# Altium footprint library SYNCBOX_V3I1.PcbLib: 268 footprints (part 8 of 17)
Each footprint in its own frame and in the unit in brackets; x right, y up, seen from the top. Pads: shape width x height; smd on the part's side, far side on the other; paste and mask are expansions set on the pad; w line width, h text height; cw(c..) or ccw(c..) is an arc to the next point about the centre after c.
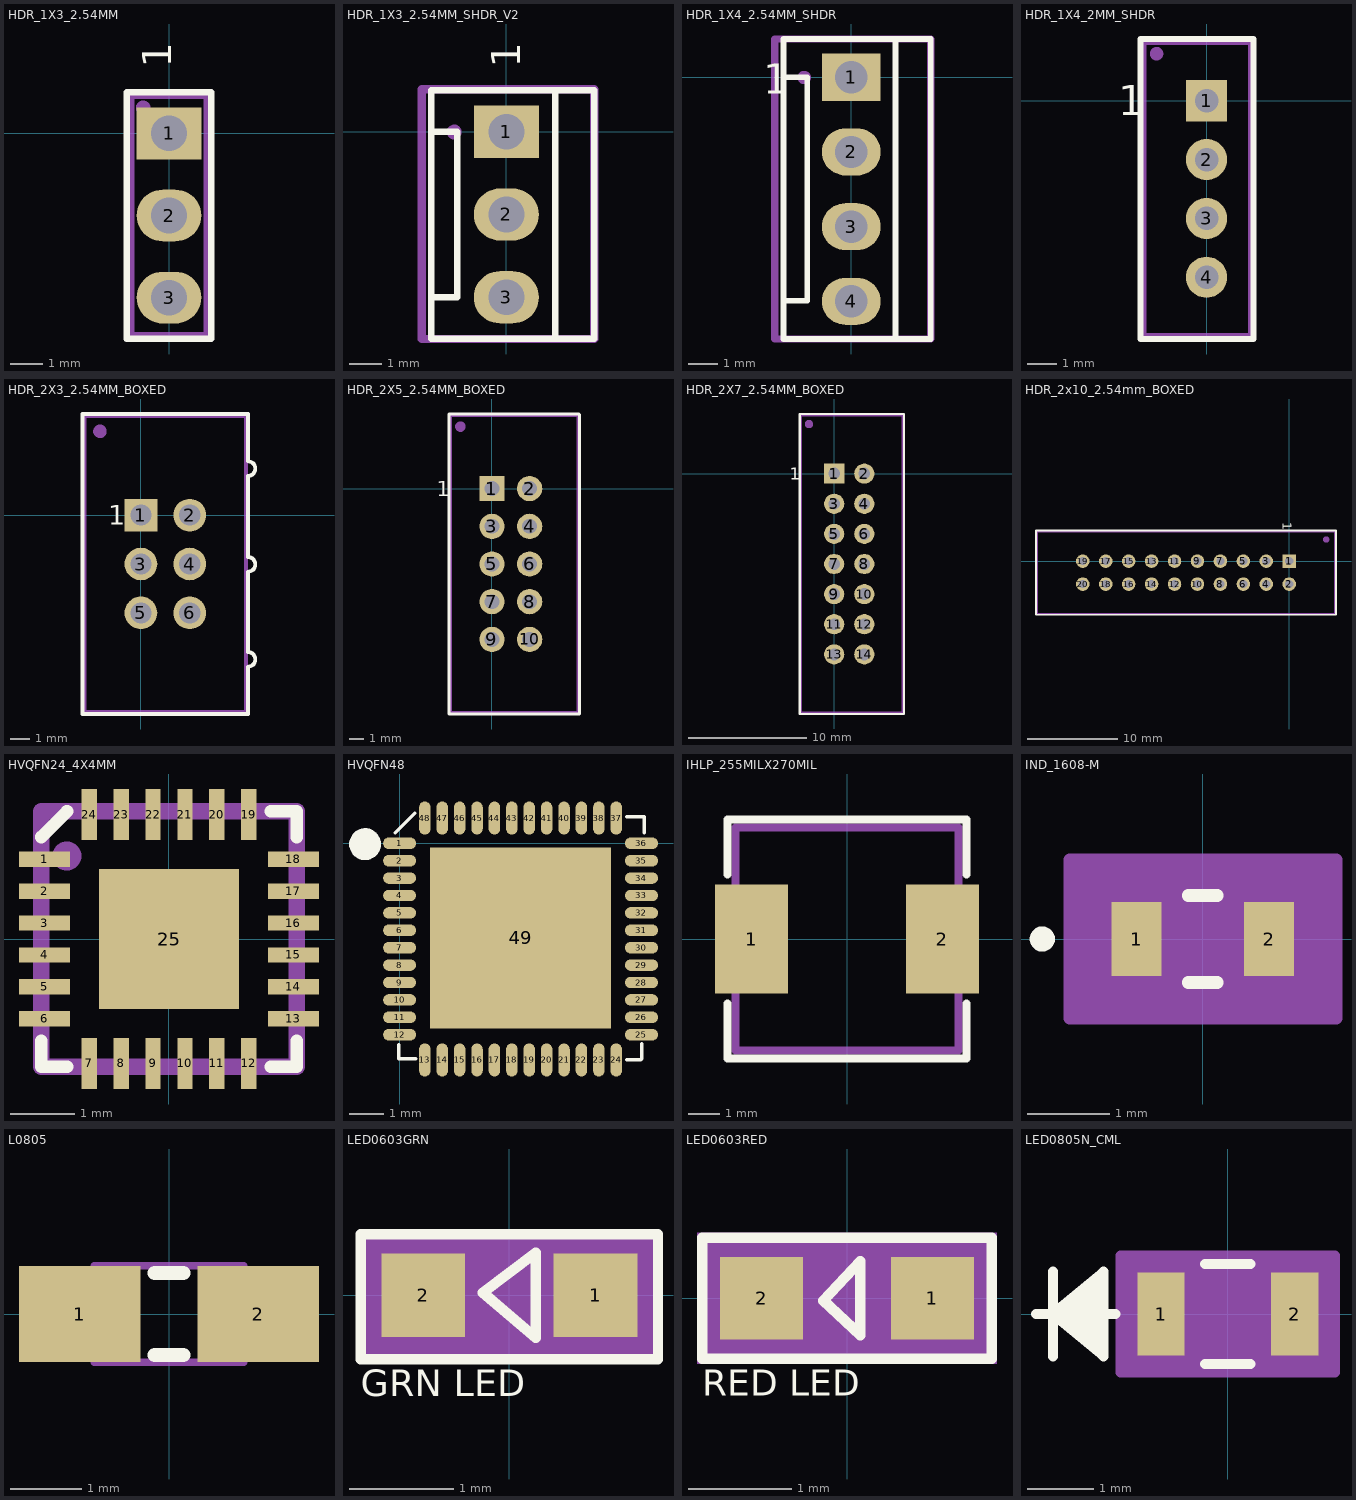
[diagram p7: the footprints below, top view; thin cyan lines are the x and y axes]

## HDR_1X3_2.54MM [mm]
pads (3):
  rect 2x1.6 hole 1.1: 1(0,0)
  oval 2x1.6 hole 1.1: 2(0,-2.54) 3(0,-5.08)
Top Overlay:
  lines w0.2: -1.3,-6.36 -1.3,1.27 1.3,1.27 1.3,-6.3 ; -1.3,-6.35 1.3,-6.35
  text "1" at 0.076,2.032 h0.89
Mechanical 16:
  circle w0.254: c-0.8,0.79 r0.1
  lines w0.254: -1.2,-6.27 1.2,-6.27 1.2,1.19 -1.2,1.19 -1.2,-6.27
Mechanical 29:
  text ".Designator" at 0.8,-4.5 h1.52
3D body "77311-y18-03_asm.stp": height 8.4, standoff -3.1, extent -1.2,-6.15 1.21,1.07

## HDR_1X3_2.54MM_SHDR_V2 [mm]
pads (3):
  rect 2x1.6 hole 1.1: 1(0,0)
  oval 2x1.6 hole 1.1: 2(0,-2.54) 3(0,-5.08)
Top Overlay:
  lines w0.2: -2.3,-5.08 -1.5,-5.08 -1.5,0 -2.3,0 ; 1.5,-6.35 1.5,1.27 ; -2.3,-6.35 -2.3,1.27 2.7,1.27 2.7,-6.35 -2.3,-6.35
  text "1" at 0.432,1.956 h0.89
Mechanical 16:
  circle w0.254: c-1.6,-0.01 r0.1
  lines w0.254: -2.6,-6.36 2.7,-6.36 2.7,1.3 -2.6,1.3 -2.6,-6.36
Mechanical 29:
  text ".Designator" at -0.6,-0.9 h1.52
3D body "76384-303LFc.STEP": height 8.84, standoff -3.93, extent -2.642,-5.799 2.607,0.821

## HDR_1X4_2.54MM_SHDR [mm]
pads (4):
  rect 2x1.6 hole 1.1: 1(0,0)
  oval 2x1.6 hole 1.1: 2(0,-2.54) 3(0,-5.08) 4(0,-7.62)
Top Overlay:
  lines w0.2: -2.3,-7.6 -1.5,-7.6 -1.5,0 -2.3,0 ; 1.5,-8.9 1.5,1.3 ; -2.3,-8.9 -2.3,1.3 2.7,1.3 2.7,-8.9 -2.3,-8.9
  text "1" at -2.994,-0.57 h1.02
Mechanical 16:
  circle w0.254: c-1.6,-0.01 r0.1
  lines w0.254: -2.6,-8.9 2.7,-8.9 2.7,1.3 -2.6,1.3 -2.6,-8.9
Mechanical 29:
  text ".Designator" at -1,-1.84 h1.52
3D body "76384-304lf.stp": height 9.34, standoff -3.43, extent -2.6,-8.39 2.649,0.77

## HDR_1X4_2MM_SHDR [mm]
pads (4):
  rect 1.4x1.4 hole 0.8: 1(0,0)
  round 1.4 hole 0.8: 2(0,-2) 3(0,-4) 4(0,-6)
Top Overlay:
  lines w0.2: -2.25,-8.1 -2.25,2.1 1.6,2.1 1.6,-8.1 -2.25,-8.1
  text "1" at -3,-0.5 h1.02
Mechanical 16:
  circle w0.254: c-1.7,1.6 r0.1
  lines w0.2: -2.15,-8 1.5,-8 1.5,2 -2.15,2 -2.15,-8
Mechanical 29:
  text ".Designator" at 0.5,-5.2 h1.52
3D body "532530470.stp": height 5.55, standoff -3.45, extent -2.15,-8 1.5,2

## HDR_2X3_2.54MM_BOXED [mm]
pads (6):
  rect 1.7x1.7 hole 1.1: 1(0,0)
  round 1.7 hole 1.1: 2(2.54,0) 3(0,-2.54) 4(2.54,-2.54) 5(0,-5.08) 6(2.54,-5.08)
Top Overlay:
  lines w0.2: 5.57,-10.34 -3.03,-10.34 -3.03,5.26 5.57,5.26 5.57,2.8 cw(c5.57,2.42) 5.57,2.04 5.57,-2.18 cw(c5.57,-2.56) 5.57,-2.94 5.57,-7.12 cw(c5.57,-7.5) 5.57,-7.88 5.57,-10.3
  text "1" at -1.7,-0.5 h1.02
Mechanical 16:
  circle w0.5: c-2.13,4.36 r0.1
  lines w0.2: -2.93,-10.24 -2.93,5.16 5.47,5.16 5.47,-10.24 -2.93,-10.24
Mechanical 29:
  text ".Designator" at 2,-4.5 h1.52
3D body "30306-6002.stp": height 8.89, standoff -3.17, extent -2.931,-10.155 5.883,5.06

## HDR_2X5_2.54MM_BOXED [mm]
pads (10):
  rect 1.7x1.7 hole 1: 1(0,0)
  round 1.7 hole 1: 2(2.54,0) 3(0,-2.54) 4(2.54,-2.54) 5(0,-5.08) 6(2.54,-5.08) 7(0,-7.62) 8(2.54,-7.62) 9(0,-10.16) 10(2.54,-10.16)
Top Overlay:
  lines w0.2: -2.9,-15.19 5.89,-15.19 5.89,5 5.86,5.03 -2.9,5.03 -2.9,-15.19
  text "1" at -3.73,-0.53 h1.02
Mechanical 16:
  circle w0.5: c-2.13,4.18 r0.1
  lines w0.2: -2.8,-15.09 5.79,-15.09 5.79,4.93 -2.8,4.93 -2.8,-15.09
Mechanical 29:
  text ".Designator" at 2,-7 h1.52
3D body "30310-6002.stp": height 8.89, standoff -3.17, extent -2.906,-15.22 5.908,5.075

## HDR_2X7_2.54MM_BOXED [mm]
pads (14):
  rect 1.7x1.7 hole 1: 1(0,0)
  round 1.7 hole 1: 2(2.54,0) 3(0,-2.54) 4(2.54,-2.54) 5(0,-5.08) 6(2.54,-5.08) 7(0,-7.62) 8(2.54,-7.62) 9(0,-10.16) 10(2.54,-10.16) 11(0,-12.7) 12(2.54,-12.7) 13(0,-15.24) 14(2.54,-15.24)
Top Overlay:
  lines w0.2: -2.9,-20.27 -2.9,5.03 5.89,5.03 5.89,-20.27 -2.9,-20.27
  text "1" at -3.73,-0.53 h1.02
Mechanical 16:
  circle w0.5: c-2.13,4.18 r0.1
  lines w0.2: -2.8,-20.17 -2.8,4.93 5.79,4.93 5.79,-20.17 -2.8,-20.17
Mechanical 29:
  text ".Designator" at 2,-9.5 h1.52
3D body "30314-6002.stp": height 8.89, standoff -3.17, extent -2.91,-20.312 5.904,5.062

## HDR_2x10_2.54mm_BOXED [mm]
pads (20):
  rect 1.5x1.5 hole 0.9: 1(0,0)
  round 1.5 hole 0.9: 2(0,-2.54) 3(-2.54,0) 4(-2.54,-2.54) 5(-5.08,0) 6(-5.08,-2.54) 7(-7.62,0) 8(-7.62,-2.54) 9(-10.16,0) 10(-10.16,-2.54) 11(-12.7,0) 12(-12.7,-2.54) 13(-15.24,0) 14(-15.24,-2.54) 15(-17.78,0) 16(-17.78,-2.54) 17(-20.32,0) 18(-20.32,-2.54) 19(-22.86,0) 20(-22.86,-2.54)
Top Overlay:
  lines w0.2: -28.04,-5.942 -28.04,3.402 5.178,3.402 5.18,3.4 5.18,-5.942 -28.04,-5.942
  text "1" at -0.7,4.3 h1.02
Mechanical 16:
  circle w0.5: c4.1,2.4 r0.1
  lines w0.2: -27.94,-5.842 -27.94,3.302 5.08,3.302 5.08,-5.842 -27.94,-5.842
Mechanical 29:
  text ".Designator" at -13.5,-2 h1.52
3D body "c-5103308-5-b-3d.stp": height 9.9, standoff -3, extent -27.935,-5.847 5.085,3.297

## HVQFN24_4X4MM [mm]
pads (25):
  rect 0.8x0.24 smd mask+0.025: 1(-1.95,1.25) 2(-1.95,0.75) 3(-1.95,0.25) 4(-1.95,-0.25) 5(-1.95,-0.75) 6(-1.95,-1.25) 13(1.95,-1.25) 14(1.95,-0.75) 15(1.95,-0.25) 16(1.95,0.25) 17(1.95,0.75) 18(1.95,1.25)
  rect 0.24x0.8 smd mask+0.025: 7(-1.25,-1.95) 8(-0.75,-1.95) 9(-0.25,-1.95) 10(0.25,-1.95) 11(0.75,-1.95) 12(1.25,-1.95) 19(1.25,1.95) 20(0.75,1.95) 21(0.25,1.95) 22(-0.25,1.95) 23(-0.75,1.95) 24(-1.25,1.95)
  rect 2.2x2.2 smd mask+0.025: 25(0,0)
Top Overlay:
  lines w0.2: -2,-1.6 -2,-2 -1.6,-2 ; -2,1.6 -1.6,2 ; 1.6,-2 2,-2 2,-1.6 ; 1.6,2 2,2 2,1.6
Mechanical 16:
  circle w0.254: c-1.6,1.3 r0.1
  lines w0.254: -2,-2 2,-2 2,2 -2,2 -2,-2
Mechanical 29:
  text ".Designator" at -0.2,0.7 h0.6
3D body: height 1, standoff 0, extent -2,-2 2,2

## HVQFN48 [mm]
pads (49):
  oval 0.95x0.33 smd: 1(0,0) 2(0,-0.5) 3(0,-1) 4(0,-1.5) 5(0,-2) 6(0,-2.5) 7(0,-3) 8(0,-3.5) 9(0,-4) 10(0,-4.5) 11(0,-5) 12(0,-5.5) 25(6.95,-5.5) 26(6.95,-5) 27(6.95,-4.5) 28(6.95,-4) 29(6.95,-3.5) 30(6.95,-3) 31(6.95,-2.5) 32(6.95,-2) 33(6.95,-1.5) 34(6.95,-1) 35(6.95,-0.5) 36(6.95,0)
  oval 0.33x0.95 smd: 13(0.725,-6.225) 14(1.225,-6.225) 15(1.725,-6.225) 16(2.225,-6.225) 17(2.725,-6.225) 18(3.225,-6.225) 19(3.725,-6.225) 20(4.225,-6.225) 21(4.725,-6.225) 22(5.225,-6.225) 23(5.725,-6.225) 24(6.225,-6.225) 37(6.225,0.725) 38(5.725,0.725) 39(5.225,0.725) 40(4.725,0.725) 41(4.225,0.725) 42(3.725,0.725) 43(3.225,0.725) 44(2.725,0.725) 45(2.225,0.725) 46(1.725,0.725) 47(1.225,0.725) 48(0.725,0.725)
  rect 5.2x5.2 smd: 49(3.48,-2.718)
Top Overlay:
  circle w0.508: c-0.991,-0.025 r0.205
  lines w0.102: -0.127,0.305 0.432,0.864 ; -0.025,-5.791 -0.025,-6.198 0.457,-6.198 ; 6.528,-6.223 6.934,-6.223 6.96,-6.198 6.96,-5.766 ; 6.528,0.762 7.036,0.762 7.036,0.305
3D body: height 0.85, standoff 0, extent 0,-6.223 6.96,0.762

## IHLP_255MILX270MIL [mil]
pads (2):
  rect 90x135 smd: 1(-118,0) 2(118,0)
Top Overlay:
  lines w10: -147.64,-80 -147.64,-147.64 147.64,-147.64 147.64,-80 ; -147.64,80 -147.64,147.64 147.64,147.64 147.64,80
Mechanical 16:
  lines w10: -137.8,-137.8 -137.8,137.8 137.8,137.8 137.8,-137.8 -137.8,-137.8
Mechanical 29:
  text ".Designator" at -43.31,-27.56 h60
3D body: height 78.74, standoff 0, extent 119.34,-62.92 135.09,63.06
3D body: height 78.74, standoff 0, extent -134.93,-62.92 -119.18,63.07
3D body: height 118.11, standoff 0, extent -119.25,-106.42 -95.53,106.57
3D body: height 118.11, standoff 0, extent 95.63,-106.43 119.34,106.57
3D body: height 118.11, standoff 0, extent 72.2,-130 119.25,-82.85
3D body: height 118.11, standoff 0, extent 72.19,82.95 119.34,130.01
3D body: height 118.11, standoff 0, extent -119.25,82.94 -72.1,130
3D body: height 118.11, standoff 0, extent -119.25,-130 -72.19,-82.85
3D body: height 118.11, standoff 0, extent -95.72,-130 95.77,130.01

## IND_1608-M [mm]
pads (2):
  rect 0.605x0.902 smd paste+0 mask+0: 1(-0.802,0) 2(0.802,0)
Top Overlay:
  circle w0.152: c-1.943,0 r0.076
  lines w0.152: -0.176,-0.527 0.176,-0.527 ; -0.176,0.527 0.176,0.527
Mechanical 13:
  circle w0: c-0.675,0 r0.076
  lines w0.025: -0.8,-0.4 -0.8,0.4 ; -0.8,-0.4 -0.5,-0.4 -0.5,0.4 -0.8,0.4 ; -0.8,-0.4 0.8,-0.4 ; -0.8,-0.4 -0.8,0.4 ; -0.8,0.4 0.8,0.4 ; 0.8,-0.4 0.5,-0.4 0.5,0.4 0.8,0.4 ; 0.8,-0.4 0.8,0.4 ; 0.8,-0.4 0.8,0.4
Mechanical 15:
  region: 1.613,-0.959 -1.613,-0.959 -1.613,0.959 1.613,0.959
  lines w0.152: -1.613,-0.959 -1.613,0.959 1.613,0.959 1.613,-0.959 -1.613,-0.959
3D body "STEP-WE-CBF-0603-rev1 (1).stp": height 0.78, standoff -0.02, extent -0.8,-0.4 0.8,0.4
3D body: height 0.25, standoff 0, extent 0,0 0.254,0.254

## L0805 [mm]
height 1.45
pads (2):
  rect 1.7x1.35 smd: 1(-1.25,0) 2(1.25,0)
Top Overlay:
  lines w0.2: -0.2,-0.575 0.2,-0.575 ; -0.2,0.575 0.2,0.575
Mechanical 13:
  lines w0.1: -1.05,-0.675 1.05,-0.675 1.05,0.675 -1.05,0.675 -1.05,-0.675
3D body: height 1.45, standoff 0, extent -1.05,-0.675 1.05,0.675

## LED0603GRN [mm]
pads (2):
  rect 0.8x0.8 smd: 1(0.825,0) 2(-0.825,0)
Top Overlay:
  lines w0.1: -1.422,-0.61 -1.422,0.403 -1.422,0.584 1.422,0.584 1.422,-0.61 -1.422,-0.61 ; -0.254,0.025 0.254,-0.406 0.254,0.406 -0.254,0.025
  text "GRN LED" at -1.422,-0.965 h0.25
Mechanical 15:
  rectangle: -1.448,-0.584 1.397,0.61
3D body "APT1608.STEP": height 0.75, standoff 0, extent -0.759,-0.4 0.852,0.4

## LED0603RED [mm]
pads (2):
  rect 0.8x0.8 smd: 1(0.825,0) 2(-0.825,0)
Top Overlay:
  lines w0.1: -1.397,-0.584 1.397,-0.584 1.397,0.584 -1.397,0.584 -1.397,-0.584
  lines w0.102: -0.229,-0.024 0.127,-0.356 0.127,0.356 -0.229,-0.024
  text "RED LED" at -1.397,-0.94 h0.25
Mechanical 15:
  rectangle: -1.448,-0.635 1.448,0.635
3D body "APT1608.STEP": height 0.75, standoff 0, extent -0.806,-0.406 0.805,0.394

## LED0805N_CML [mil]
pads (2):
  rect 28x49 smd paste+0 mask+0: 1(-39.5,0) 2(39.5,0)
Top Overlay:
  lines w6: -113.5,0 -66.6,0 ; -103.5,-25 -103.5,25 ; -73.5,-20 -103.5,0 ; -73.5,-15 -103.5,0 ; -73.5,-10 -103.5,0 ; -73.5,-5 -103.5,0 ; -73.5,5 -103.5,0 ; -73.5,10 -103.5,0 ; -73.5,15 -103.5,0 ; -73.5,20 -103.5,0 ; -13.39,-29.5 13.39,-29.5 ; -13.39,29.5 13.39,29.5 ; -103.5,0 -73.5,25 -73.5,-25 -103.5,0
Mechanical 13:
  lines w1: -113.5,0 -63.5,0 ; -103.5,-25 -103.5,25 ; -73.5,-20 -103.5,0 ; -73.5,-15 -103.5,0 ; -73.5,-10 -103.5,0 ; -73.5,-5 -103.5,0 ; -73.5,5 -103.5,0 ; -73.5,10 -103.5,0 ; -73.5,15 -103.5,0 ; -73.5,20 -103.5,0 ; -103.5,0 -73.5,25 -73.5,-25 -103.5,0 ; -39.5,-24.5 -39.5,24.5 ; -39.5,-24.5 -25.5,-24.5 -25.5,24.5 -39.5,24.5 ; -39.5,-24.5 39.5,-24.5 ; -39.5,-24.5 -39.5,24.5 ; -39.5,24.5 39.5,24.5 ; 39.5,-24.5 25.5,-24.5 25.5,24.5 39.5,24.5 ; 39.5,-24.5 39.5,24.5 ; 39.5,-24.5 39.5,24.5
Mechanical 15:
  region: 63.5,-34.5 -63.5,-34.5 -63.5,34.5 63.5,34.5
  lines w6: -63.5,-34.5 -63.5,34.5 63.5,34.5 63.5,-34.5 -63.5,-34.5
3D body "LED0805N_CML.step": height 30.98, standoff 0, extent -39.49,-24.49 39.49,24.49
3D body: height 10, standoff 0, extent 0,0 10,10